# Altium schematic symbol library KIT_ARDUINO_R00.SchLib: 6 symbols
Pins are listed as number, name and electrical type; pins without a type are passive.

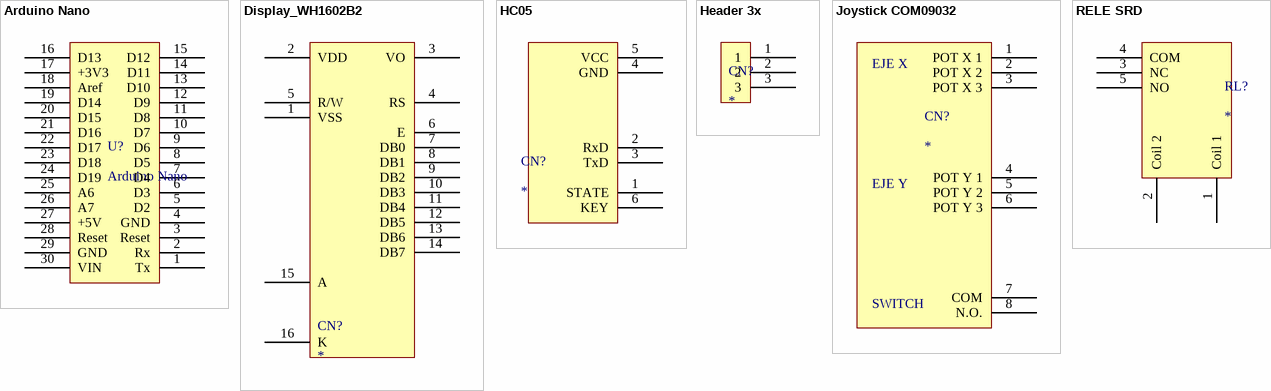
[diagram p0: symbols Arduino Nano to RELE SRD]

## Arduino Nano
designator U?
Microcontroller
pins: 1 Tx, 2 Rx, 3 Reset, 4 GND, 5 D2, 6 D3, 7 D4, 8 D5, 9 D6, 10 D7, 11 D8, 12 D9, 13 D10, 14 D11, 15 D12, 16 D13, 17 +3V3, 18 Aref, 19 D14, 20 D15, 21 D16, 22 D17, 23 D18, 24 D19, 25 A6, 26 A7, 27 +5V, 28 Reset, 29 GND, 30 VIN

## Display_WH1602B2
designator CN?
pins: 1 VSS, 2 VDD, 3 VO, 4 RS, 5 R/W, 6 E, 7 DB0, 8 DB1, 9 DB2, 10 DB3, 11 DB4, 12 DB5, 13 DB6, 14 DB7, 15 A, 16 K

## HC05
designator CN?
pins: 1 STATE, 2 RxD, 3 TxD, 4 GND, 5 VCC, 6 KEY

## Header 3x
designator CN?
pins: 1, 2, 3

## Joystick COM09032
designator CN?
pins: 1 POT X 1, 2 POT X 2, 3 POT X 3, 4 POT Y 1, 5 POT Y 2, 6 POT Y 3, 7 COM, 8 N.O.
text: EJE X; EJE Y; SWITCH

## RELE SRD
designator RL?
pins: 1 Coil 1, 2 Coil 2, 3 NC, 4 COM, 5 NO